# Altium footprint library Crystal_Osilator$.PcbLib: 54 footprints (part 2 of 4)
Each footprint in its own frame and in the unit in brackets; x right, y up, seen from the top. Pads: shape width x height; smd on the part's side, far side on the other; paste and mask are expansions set on the pad; w line width, h text height; cw(c..) or ccw(c..) is an arc to the next point about the centre after c.
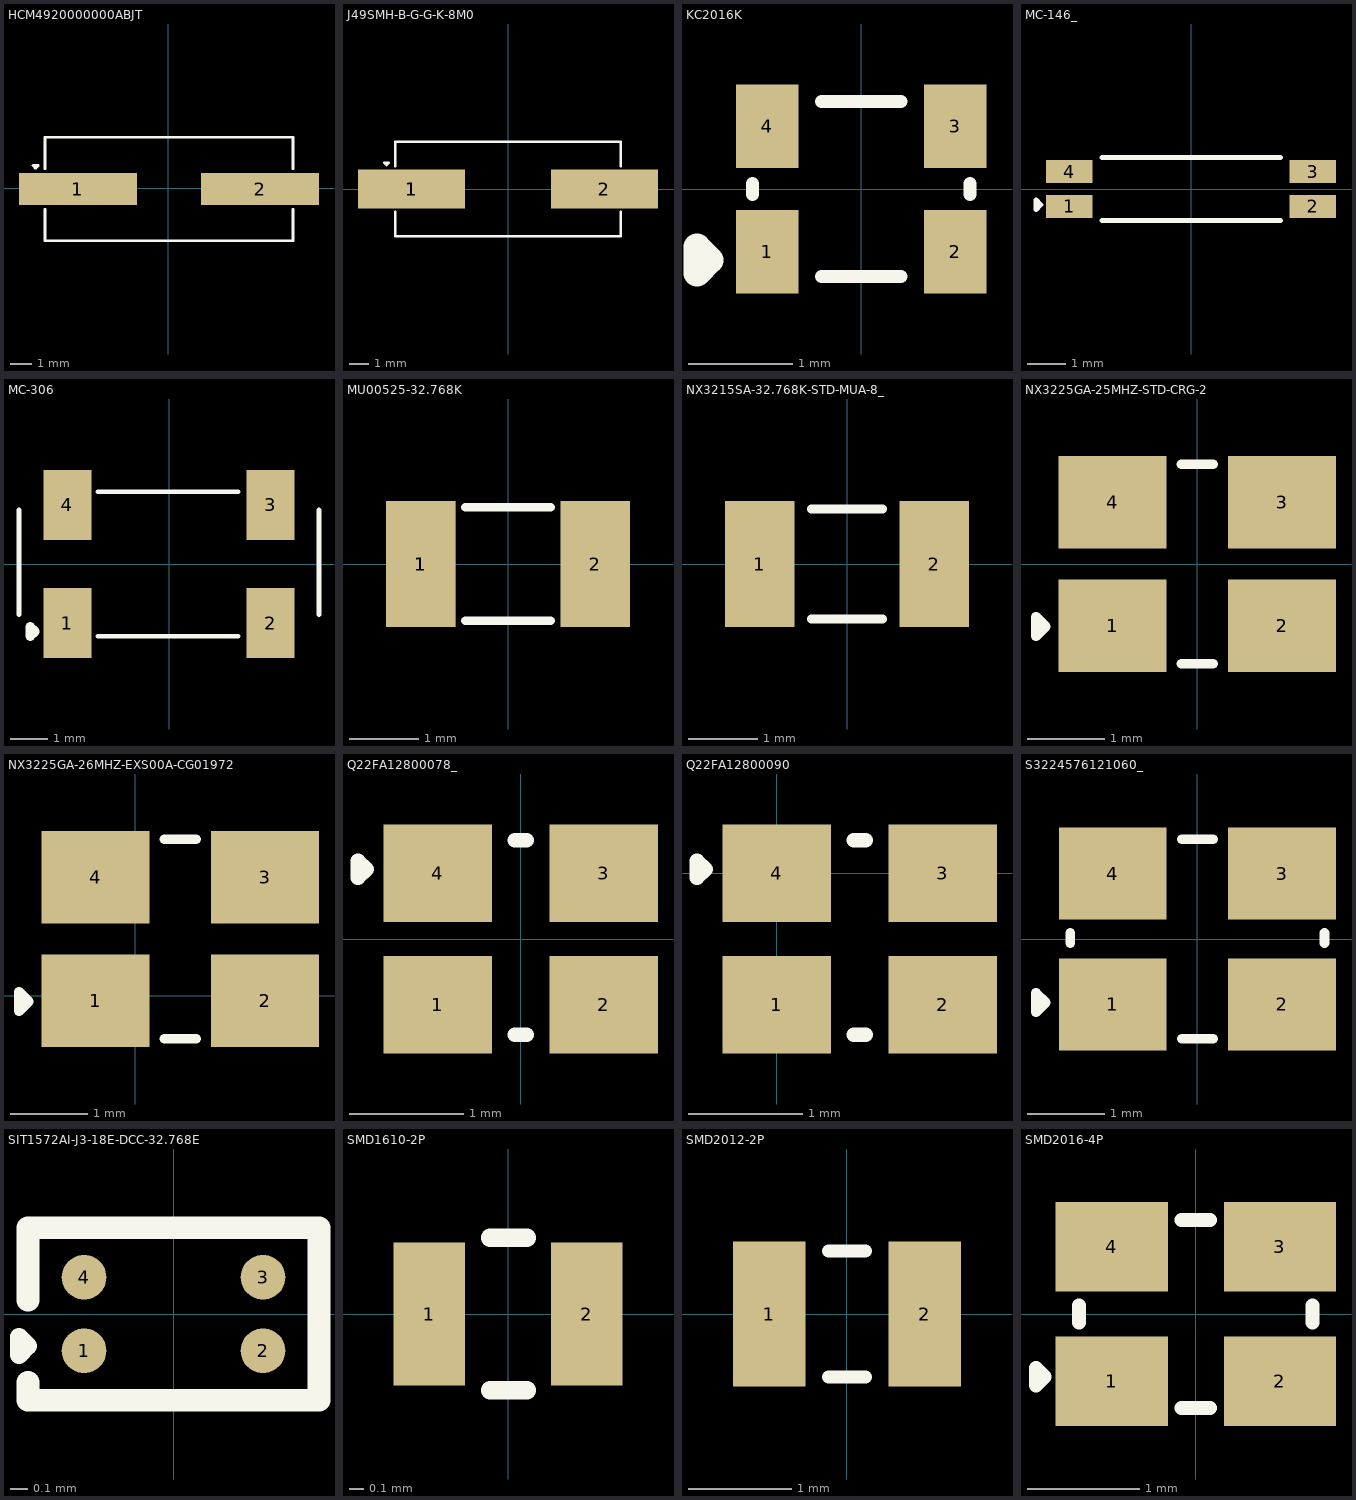
[diagram p1: the footprints below, top view; thin cyan lines are the x and y axes]

## HCM4920000000ABJT [mm] "CRYSTAL 20.0000MHZ 18PF SMD"
pads (2):
  rect 5.5x1.5 smd: 1(-4.225,-0.025) 2(4.275,-0.025)
Top Overlay:
  lines w0.127: -5.765,-0.965 -5.765,-2.441 5.814,-2.441 ; -5.765,0.914 -5.765,2.39 5.814,2.39 ; 5.816,-2.441 5.816,-0.965 ; 5.816,0.914 5.816,2.39 ; -6.325,1.067 -6.071,1.067 -6.198,0.94 -6.325,1.067
3D body "User Library-Crystal HC49_US-SM.STEP": height 4.3, standoff 0, extent -6.374,-2.44 6.426,2.39

## J49SMH-B-G-G-K-8M0 [mm]
pads (4):
  rect 5.5x2 smd: 1(-4.95,0) 1(-4.95,0) 1(-4.95,0) 2(4.95,0)
Top Overlay:
  lines w0.127: -5.779,-1.168 -5.779,-2.415 5.766,-2.415 ; -5.779,1.168 -5.779,2.415 5.779,2.415 5.779,1.168 ; 5.779,-2.415 5.779,-1.168 ; -6.364,1.346 -6.11,1.346 -6.237,1.219 -6.364,1.346
3D body "ABLS-8.000MHZ-B4-T.step": height 4.16, standoff 0, extent -6.35,-2.349 6.35,2.349

## KC2016K [mm]
pads (4):
  rect 0.6x0.8 smd: 1(-0.9,-0.6) 2(0.9,-0.6) 3(0.9,0.6) 4(-0.9,0.6)
Top Overlay:
  lines w0.127: -1.041,-0.051 -1.041,0.051 ; -0.381,-0.838 0.381,-0.838 ; -0.381,0.838 0.381,0.838 ; 1.041,-0.051 1.041,0.051
  lines w0.254: -1.573,-0.808 -1.446,-0.681 -1.573,-0.554 -1.573,-0.808
3D body "KC2016K_KYO.step": height 0.81, standoff 0, extent -1.003,-0.8 1.003,0.8

## MC-146_ [mm]
pads (4):
  rect 1.2x0.6 smd: 1(-3.15,-0.45) 2(3.15,-0.45) 3(3.15,0.45) 4(-3.15,0.45)
Top Overlay:
  lines w0.127: -2.311,-0.813 2.311,-0.813 ; -2.311,0.813 2.311,0.813 ; -4.013,-0.533 -3.886,-0.406 -4.013,-0.279 -4.013,-0.533
3D body "Crystal_SMD_SeikoEpson_MC146-4Pin_6.7x1.5mm.step": height 1.45, standoff 0, extent -3.35,-0.75 3.55,0.75

## MC-306 [mm]
pads (4):
  rect 1.3x1.9 smd: 1(-2.75,-1.6) 2(2.75,-1.6) 3(2.75,1.6) 4(-2.75,1.6)
Top Overlay:
  lines w0.127: -4.064,-1.372 -4.064,1.473 ; -1.93,-1.956 1.88,-1.956 ; -1.93,1.956 1.88,1.956 ; 4.064,-1.372 4.064,1.473
  lines w0.254: -3.759,-1.956 -3.632,-1.829 -3.759,-1.702 -3.759,-1.956
3D body "User Library-mc-306 crystal.step": height 2.54, standoff -0.03, extent -4,-1.9 4,1.9

## MU00525-32.768K [mm]
pads (4):
  rect 1x1.8 smd: 1(-1.25,0) 1(-1.25,0) 2(1.25,0)
  rect 1x1.8 on Mech1: 1(-1.25,0)
Top Overlay:
  lines w0.127: -0.61,-0.813 0.61,-0.813 ; -0.61,0.813 0.61,0.813
3D body "NX3215SA-32.768KHZ-EXS00A-MU00525.step": height 0.9, standoff 0, extent -1.6,-0.75 1.6,0.75

## NX3215SA-32.768K-STD-MUA-8_ [mm]
pads (2):
  rect 1x1.8 smd: 1(-1.25,0) 2(1.25,0)
Top Overlay:
  lines w0.127: -0.508,-0.787 0.508,-0.787 ; -0.508,0.787 0.508,0.787
3D body "User Library-NDK_NX3215SA.STEP": height 0.8, standoff 0, extent -1.6,-0.75 1.6,0.75

## NX3225GA-25MHZ-STD-CRG-2 [mm]
pads (4):
  rect 1.4x1.2 smd: 1(-1.1,-0.8) 2(1.1,-0.8) 3(1.1,0.8) 4(-1.1,0.8)
Top Overlay:
  lines w0.127: -0.203,-1.295 0.203,-1.295 ; -0.203,1.295 0.203,1.295 ; -2.093,-0.938 -1.966,-0.811 -2.093,-0.684 -2.093,-0.938
3D body "NX3225GA-25MHZ-STD-CRG-2.STEP": height 0.8, standoff 0, extent -1.6,-1.257 1.6,1.243

## NX3225GA-26MHZ-EXS00A-CG01972 [mm]
pads (4):
  rect 1.4x1.2 smd: 1(-0.516,-0.063) 2(1.684,-0.063) 3(1.684,1.537) 4(-0.516,1.537)
Top Overlay:
  lines w0.127: 0.381,-0.559 0.787,-0.559 ; 0.381,2.032 0.787,2.032 ; -1.509,-0.202 -1.509,0.052 -1.382,-0.075 -1.509,-0.202
3D body "NX3225GA-25MHZ-STD-CRG-2.STEP": height 0.8, standoff 0, extent -1.016,-0.521 2.184,1.979

## Q22FA12800078_ [mm] "37.4MHz SMD Crystal Resonator 9pF 60O ±10ppm -40?~+85? SMD2016-4P Crystals"
pads (4):
  rect 0.95x0.85 smd: 1(-0.725,-0.575) 2(0.725,-0.575) 3(0.725,0.575) 4(-0.725,0.575)
Top Overlay:
  lines w0.127: -0.051,-0.838 0.051,-0.838 ; -0.051,0.864 0.051,0.864 ; -1.422,0.533 -1.422,0.686 -1.346,0.61 -1.422,0.533
3D body "User Library-XRCGB27M000F2P00R0.STEP": height 0.65, standoff 0, extent -1.023,-0.784 0.977,0.816

## Q22FA12800090 [mm]
pads (4):
  rect 0.95x0.85 smd: 1(0,-1.15) 2(1.45,-1.15) 3(1.45,0) 4(0,0)
Top Overlay:
  lines w0.127: 0.674,-1.413 0.776,-1.413 ; 0.674,0.289 0.776,0.289 ; -0.697,-0.042 -0.621,0.035 -0.697,0.111 -0.697,-0.042
3D body "User Library-XRCGB27M000F2P00R0.STEP": height 0.65, standoff 0, extent -0.298,-1.359 1.702,0.241

## S3224576121060_ [mm] "24.576MHz SMD Crystal Resonator 12pF 60O ±10ppm -40?~+85? SMD3225-4P Crystals ROHS"
pads (4):
  rect 1.4x1.2 smd: 1(-1.1,-0.85) 2(1.1,-0.85) 3(1.1,0.85) 4(-1.1,0.85)
Top Overlay:
  lines w0.127: -1.651,-0.051 -1.651,0.076 ; -0.203,-1.295 0.203,-1.295 ; -0.203,1.295 0.203,1.295 ; 1.651,-0.051 1.651,0.076 ; -2.095,-0.953 -2.095,-0.699 -1.968,-0.826 -2.095,-0.953
3D body "User Library-Crystal_ECX-32.STEP": height 0.82, standoff 0, extent -1.6,-1.25 1.6,1.25

## SIT1572AI-J3-18E-DCC-32.768E [mm]
pads (4):
  round 0.25 smd mask+0.05: 1(-0.5,-0.205) 2(0.5,-0.205) 3(0.5,0.205) 4(-0.5,0.205)
Top Overlay:
  lines w0.1: -0.864,-0.229 -0.813,-0.178 -0.864,-0.127 -0.864,-0.229
  lines w0.127: -0.813,-0.381 -0.813,-0.483 0.813,-0.483 0.813,0.483 -0.813,0.483 -0.813,0.076
3D body "BGA4_SiT1532_SIT.step": height 0.61, standoff 0, extent -0.775,-0.432 0.775,0.432

## SMD1610-2P [mm]
pads (2):
  rect 0.5x1 smd: 1(-0.55,0) 2(0.55,0)
Top Overlay:
  lines w0.127: -0.127,-0.533 0.133,-0.533 ; -0.127,0.533 0.133,0.533
3D body "ECS-.327-12.5-16-TR--3DModel-STEP-1.STEP": height 0.5, standoff 0, extent -0.8,-0.5 0.8,0.5

## SMD2012-2P [mm]
pads (2):
  rect 0.7x1.4 smd: 1(-0.75,0) 2(0.75,0)
Top Overlay:
  lines w0.127: -0.178,-0.61 0.178,-0.61 ; -0.178,0.61 0.178,0.61
3D body "User Library-32_768KHZ.step": height 0.6, standoff -0.05, extent -1.018,-0.616 1.032,0.584

## SMD2016-4P [mm]
pads (4):
  rect 1x0.8 smd paste+0 mask+0.051: 1(-0.75,-0.6) 2(0.75,-0.6) 3(0.75,0.6) 4(-0.75,0.6)
Top Overlay:
  lines w0.127: -1.041,-0.076 -1.041,0.076 ; -0.127,-0.838 0.127,-0.838 ; -0.127,0.838 0.127,0.838 ; 1.041,-0.076 1.041,0.076 ; -1.425,-0.635 -1.349,-0.559 -1.425,-0.483 -1.425,-0.635
3D body "C1986227.step": height 0.47, standoff 0, extent -1,-0.8 1,0.8